# Altium footprint library Mosfet$.PcbLib: 62 footprints (part 2 of 4)
Each footprint in its own frame and in the unit in brackets; x right, y up, seen from the top. Pads: shape width x height; smd on the part's side, far side on the other; paste and mask are expansions set on the pad; w line width, h text height; cw(c..) or ccw(c..) is an arc to the next point about the centre after c.
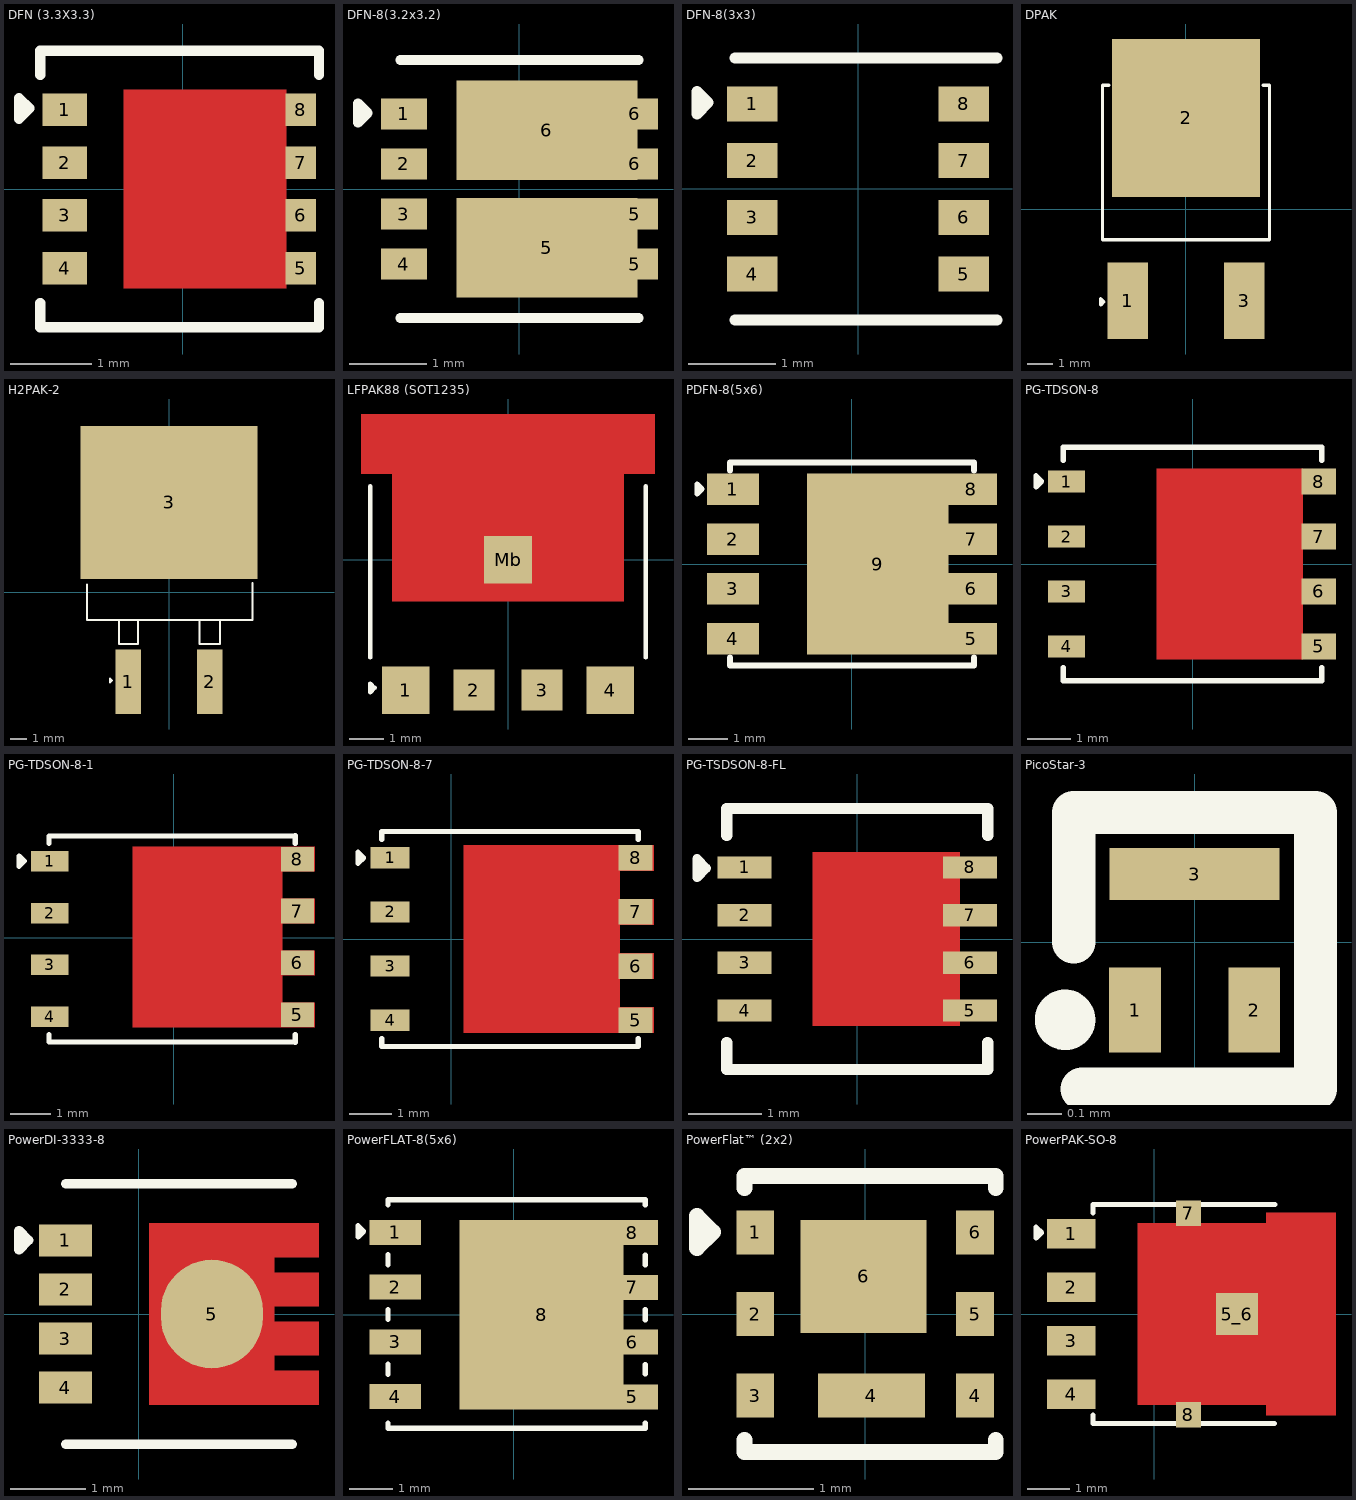
[diagram p1: the footprints below, top view; thin cyan lines are the x and y axes]

## DFN (3.3X3.3) [mm]
pads (8):
  rect 0.55x0.4 smd: 1(-1.45,0.975) 2(-1.45,0.325) 3(-1.45,-0.325) 4(-1.45,-0.975)
  rect 0.38x0.4 smd: 5(1.45,-0.975) 6(1.45,-0.325) 7(1.45,0.325) 8(1.45,0.975)
Top Layer:
  region: -0.725,1.225 -0.725,-1.225 1.275,-1.225 1.275,1.225
Top Overlay:
  lines w0.127: -1.749,-1.4 -1.749,-1.7 1.675,-1.7 1.675,-1.4 ; -1.749,1.4 -1.749,1.7 1.675,1.7 1.675,1.4 ; -2.011,0.864 -2.011,1.118 -1.884,0.991 -2.011,0.864
3D body "User Library-DFN 3_3x3_3.step": height 0.75, standoff 0, extent -1.7,-1.65 1.62,1.65

## DFN-8(3.2x3.2) [mm]
pads (10):
  rect 0.6x0.4 smd: 1(-1.5,0.975) 2(-1.5,0.325) 3(-1.5,-0.325) 4(-1.5,-0.975) 5(1.5,-0.975) 5(1.5,-0.325) 6(1.5,0.325) 6(1.5,0.975)
  rect 2.35x1.29 smd: 5(0.356,-0.762) 6(0.356,0.762)
Top Overlay:
  lines w0.127: -1.549,-1.676 1.549,-1.676 ; -1.549,1.676 1.549,1.676 ; -2.097,0.861 -1.97,0.988 -2.097,1.115 -2.097,0.861
3D body "2105241820_ALLPOWER-ShenZhen-Quan-Li-Semiconductor-AP4008QD_C2828588.STEP": height 0.77, standoff 0, extent -1.675,-1.635 1.675,1.635

## DFN-8(3x3) [mm]
pads (8):
  rect 0.58x0.4 smd: 1(-1.21,0.975) 2(-1.21,0.325) 3(-1.21,-0.325) 4(-1.21,-0.975) 5(1.21,-0.975) 6(1.21,-0.325) 7(1.21,0.325) 8(1.21,0.975)
Top Overlay:
  lines w0.127: -1.41,-1.5 1.59,-1.5 ; -1.41,1.5 1.59,1.5 ; -1.843,0.861 -1.843,1.115 -1.716,0.988 -1.843,0.861
3D body "C357850.step": height 0.82, standoff 0, extent -1.4,-1.46 1.4,1.46

## DPAK [mm]
pads (3):
  rect 1.6x3 smd: 1(-2.285,-3.59) 3(2.285,-3.59)
  rect 5.8x6.2 smd: 2(0,3.59)
Top Overlay:
  lines w0.127: -3.023,4.877 -3.277,4.877 -3.277,-1.194 3.277,-1.194 3.277,4.877 3.023,4.877 ; -3.353,-3.759 -3.353,-3.505 -3.226,-3.632 -3.353,-3.759
3D body "MC7805BDTRKG.STEP": height 2.51, standoff -0.01, extent -3.277,-3.988 3.223,5.918

## H2PAK-2 [mm]
pads (3):
  rect 1.6x4 smd paste+0 mask+0.051: 1(-2.54,-5.578) 2(2.54,-5.578)
  rect 11x9.5 smd paste+0 mask+0.051: 3(0,5.578)
Top Overlay:
  lines w0.127: -5.1,0.478 -5.1,-1.725 5.2,-1.725 5.2,0.578 ; -3.07,-1.725 -3.1,-1.725 -3.1,-3.225 -1.927,-3.225 -1.927,-1.725 ; 1.959,-1.725 1.9,-1.725 1.9,-3.225 3.178,-3.225 3.178,-1.725 ; -3.683,-5.62 -3.683,-5.366 -3.556,-5.493 -3.683,-5.62
3D body "C3278109.step": height 4.6, standoff 0, extent -5.1,-6.791 5.1,8.759

## LFPAK88 (SOT1235) [mm]
pads (5):
  rect 1.4x1.4 smd: 1(-3,-3.825) 4(3,-3.825) Mb(0,0)
  rect 1.2x1.2 smd: 2(-1,-3.825) 3(1,-3.825)
Top Layer:
  region: -4.3,4.273 4.3,4.273 4.3,2.521 3.4,2.521 3.4,-1.219 -3.4,-1.219 -3.4,2.521 -4.3,2.521
Top Overlay:
  lines w0.127: -4.039,-2.87 -4.039,2.159 ; 4.039,-2.87 4.039,2.159 ; -4.039,-3.886 -3.912,-3.759 -4.039,-3.632 -4.039,-3.886
3D body "PSMNR90-40SSHJ.STEP": height 1.7, standoff 0, extent -4,-3.975 4,4.075

## PDFN-8(5x6) [mm]
pads (9):
  rect 1.321x0.8 smd paste-100 mask+0.051: 1(-3.025,1.905) 2(-3.025,0.635) 3(-3.025,-0.635) 4(-3.025,-1.905) 5(3.025,-1.905) 6(3.025,-0.635) 7(3.025,0.635) 8(3.025,1.905)
  rect 3.6x4.6 smd paste-100 mask+0.051: 9(0.65,0)
Top Overlay:
  lines w0.127: -3.94,1.778 -3.94,2.032 -3.813,1.905 -3.94,1.778
  lines w0.152: -3.101,-2.376 -3.101,-2.586 3.101,-2.586 3.101,-2.376 ; -3.101,2.376 -3.101,2.586 3.101,2.586 3.101,2.376
Top Paste:
  region: -3.686,1.505 -2.365,1.505 -2.365,2.305 -3.686,2.305
  region: -3.686,0.235 -2.365,0.235 -2.365,1.035 -3.686,1.035
  region: -3.686,-1.035 -2.365,-1.035 -2.365,-0.235 -3.686,-0.235
  region: -2.365,-1.505 -3.686,-1.505 -3.686,-2.305 -2.365,-2.305
  region: 2.365,-2.305 3.686,-2.305 3.686,-1.505 2.45,-1.505 2.45,-1.035 3.686,-1.035 3.686,-0.235 2.45,-0.235 2.45,0.235 3.686,0.235 3.686,1.035 2.45,1.035 2.45,1.505 3.686,1.505 3.686,2.305 2.365,2.305 2.365,2.3 -1.15,2.3 -1.15,-2.3 2.365,-2.3
3D body "C202231.step": height 1.01, standoff 0, extent -3.05,-2.64 3.05,2.64

## PG-TDSON-8 [mm]
pads (8):
  rect 0.85x0.5 smd: 1(-2.912,1.905) 2(-2.912,0.635) 3(-2.912,-0.635) 4(-2.912,-1.905)
  rect 0.8x0.6 smd: 5(2.913,-1.905) 6(2.913,-0.635) 7(2.913,0.635) 8(2.913,1.905)
Top Layer:
  region: -0.838,2.205 -0.838,-2.205 2.552,-2.205 2.552,2.205
Top Overlay:
  lines w0.127: -2.986,-2.4 -2.986,-2.7 2.986,-2.7 2.986,-2.4 ; -2.986,2.4 -2.986,2.7 2.986,2.7 2.986,2.4 ; -3.617,1.78 -3.49,1.907 -3.617,2.034 -3.617,1.78
3D body "User Library-TDSON-8-1.STEP": height 1, standoff 0, extent -3.075,-2.675 3.075,2.675

## PG-TDSON-8-1 [mm]
pads (8):
  rect 0.925x0.5 smd paste-1: 1(-3.03,1.88) 2(-3.03,0.61) 3(-3.03,-0.66) 4(-3.03,-1.93)
  rect 0.8x0.6 smd paste-1: 5(3.03,-1.88) 6(3.03,-0.61) 7(3.03,0.66) 8(3.03,1.93)
Top Layer:
  region: 3.457,1.63 2.657,1.63 2.657,0.96 3.457,0.96 3.457,0.36 2.657,0.36 2.657,-0.31 3.457,-0.31 3.457,-0.91 2.657,-0.91 2.657,-1.58 3.457,-1.58 3.457,-2.18 -0.998,-2.18 -0.998,2.23 3.457,2.23
Top Overlay:
  lines w0.127: -3.046,-2.362 -3.046,-2.54 2.977,-2.549 2.977,-2.362 ; -3.046,2.312 -3.046,2.49 2.977,2.499 2.977,2.312 ; -3.782,1.753 -3.655,1.88 -3.782,2.007 -3.782,1.753
Top Paste:
  region: 0.757,-1.575 -0.743,-1.575 -0.743,-0.075 0.757,-0.075
  region: 0.757,0.125 -0.743,0.125 -0.743,1.625 0.757,1.625
  region: 2.457,0.125 0.957,0.125 0.957,1.625 2.457,1.625
  region: 3.407,-0.86 2.657,-0.86 2.657,-0.36 3.407,-0.36
  region: 3.407,0.41 2.657,0.41 2.657,0.91 3.407,0.91
  region: 2.457,-1.575 0.957,-1.575 0.957,-0.075 2.457,-0.075
  region: 3.407,-2.13 2.657,-2.13 2.657,-1.63 3.407,-1.63
  region: 3.407,1.68 2.657,1.68 2.657,2.18 3.407,2.18
  region: -2.618,-2.13 -3.443,-2.13 -3.443,-1.73 -2.618,-1.73
  region: -2.618,-0.86 -3.443,-0.86 -3.443,-0.46 -2.618,-0.46
  region: -2.618,0.41 -3.443,0.41 -3.443,0.81 -2.618,0.81
  region: -2.618,1.68 -3.443,1.68 -3.443,2.08 -2.618,2.08
Top Solder:
  region: 3.557,1.53 2.757,1.53 2.757,1.06 3.557,1.06 3.557,0.26 2.757,0.26 2.757,-0.21 3.557,-0.21 3.557,-1.01 2.757,-1.01 2.757,-1.48 3.557,-1.48 3.557,-2.28 -1.098,-2.28 -1.098,2.33 3.557,2.33
3D body "User Library-DQH0008A.STEP": height 1.05, standoff 0, extent -3,-2.5 3,2.5

## PG-TDSON-8-7 [mm]
pads (8):
  rect 0.925x0.5 smd paste-1: 1(-1.432,1.905) 2(-1.432,0.635) 3(-1.432,-0.635) 4(-1.432,-1.905)
  rect 0.8x0.6 smd paste-1: 5(4.331,-1.905) 6(4.331,-0.635) 7(4.331,0.635) 8(4.331,1.905)
Top Layer:
  region: 4.758,1.605 3.958,1.605 3.958,0.935 4.758,0.935 4.758,0.335 3.958,0.335 3.958,-0.335 4.758,-0.335 4.758,-0.935 3.958,-0.935 3.958,-1.605 4.758,-1.605 4.758,-2.205 0.303,-2.205 0.303,2.205 4.758,2.205
Top Overlay:
  lines w0.127: -1.626,-2.337 -1.626,-2.515 4.397,-2.524 4.397,-2.337 ; -1.626,2.337 -1.626,2.515 4.397,2.524 4.397,2.337 ; -2.184,1.778 -2.057,1.905 -2.184,2.032 -2.184,1.778
Top Paste:
  region: 2.058,-1.6 0.558,-1.6 0.558,-0.1 2.058,-0.1
  region: 2.058,0.1 0.558,0.1 0.558,1.6 2.058,1.6
  region: 3.758,0.1 2.258,0.1 2.258,1.6 3.758,1.6
  region: 4.708,-2.155 3.958,-2.155 3.958,-1.655 4.708,-1.655
  region: 4.708,-0.885 3.958,-0.885 3.958,-0.385 4.708,-0.385
  region: 4.708,0.385 3.958,0.385 3.958,0.885 4.708,0.885
  region: -1.02,-2.105 -1.845,-2.105 -1.845,-1.705 -1.02,-1.705
  region: -1.02,-0.835 -1.845,-0.835 -1.845,-0.435 -1.02,-0.435
  region: -1.02,0.435 -1.845,0.435 -1.845,0.835 -1.02,0.835
  region: -1.02,1.705 -1.845,1.705 -1.845,2.105 -1.02,2.105
  region: 3.758,-1.6 2.258,-1.6 2.258,-0.1 3.758,-0.1
  region: 4.708,1.655 3.958,1.655 3.958,2.155 4.708,2.155
Top Solder:
  region: 4.858,1.505 4.058,1.505 4.058,1.035 4.858,1.035 4.858,0.235 4.058,0.235 4.058,-0.235 4.858,-0.235 4.858,-1.035 4.058,-1.035 4.058,-1.505 4.858,-1.505 4.858,-2.305 0.203,-2.305 0.203,2.305 4.858,2.305
3D body "User Library-DQH0008A.STEP": height 1.05, standoff 0, extent -1.603,-2.525 4.397,2.475

## PG-TSDSON-8-FL [mil]
pads (8):
  rect 29x12 smd: 1(-60.5,38.39) 2(-60.5,12.8) 3(-60.5,-12.8) 4(-60.5,-38.39) 5(60.5,-38.39) 6(60.5,-12.8) 7(60.5,12.8) 8(60.5,38.39)
Top Layer:
  region: 55,-46.5 55,46.5 -24,46.5 -24,-46.5
Top Overlay:
  lines w5: -86,33 -86,43 -81,38 -86,33
  lines w6: -70,-55.49 -70,-70 70,-70 70,-55.49 ; -70,55.49 -70,70 70,70 70,55.49
3D body "PG-TSDSON-8-25_INF.step": height 39.09, standoff 0, extent -67.01,-67.01 67.01,67.01

## PicoStar-3 [mm]
pads (3):
  rect 0.152x0.25 smd mask+0.05: 1(-0.175,-0.2) 2(0.175,-0.2)
  rect 0.5x0.152 smd mask+0.05: 3(0,0.2)
Top Overlay:
  circle w0.127: c-0.381,-0.229 r0.025
  lines w0.127: -0.356,0 -0.356,0.381 0.356,0.381 0.356,-0.432 -0.33,-0.432
3D body "CSD25501F3.STEP": height 0.2, standoff -0.02, extent -0.3,-0.375 0.3,0.325

## PowerDI-3333-8 [mm]
pads (5):
  rect 0.7x0.42 smd paste-100 mask+0.05: 1(-0.97,0.975) 2(-0.97,0.325) 3(-0.97,-0.325) 4(-0.97,-0.975)
  oval 1.35x1.44 smd: 5(0.97,0)
Top Layer:
  region: 0.14,1.2 2.39,1.2 2.39,0.75 1.8,0.75 1.8,0.55 2.39,0.55 2.39,0.1 1.8,0.1 1.8,-0.1 2.39,-0.1 2.39,-0.55 1.8,-0.55 1.8,-0.75 2.39,-0.75 2.39,-1.2 0.14,-1.2
Top Overlay:
  lines w0.127: -0.965,-1.727 2.035,-1.727 ; -0.965,1.727 2.035,1.727 ; -1.586,0.85 -1.459,0.977 -1.586,1.104 -1.586,0.85
Top Paste:
  region: -0.62,1.19 -0.62,0.76 -1.32,0.76 -1.32,1.19
  region: -0.62,0.54 -0.62,0.11 -1.32,0.11 -1.32,0.54
  region: -0.62,-0.11 -0.62,-0.54 -1.32,-0.54 -1.32,-0.11
  region: -0.62,-0.76 -0.62,-1.19 -1.32,-1.19 -1.32,-0.76
  region: 2.39,-1.2 0.14,-1.2 0.14,1.2 2.39,1.2 2.39,0.75 1.8,0.75 1.8,0.55 2.39,0.55 2.39,0.1 1.8,0.1 1.8,-0.1 2.39,-0.1 2.39,-0.55 1.8,-0.55 1.8,-0.75 2.39,-0.75
3D body "C2802568.step": height 0.81, standoff 0, extent -1.12,-1.66 2.2,1.66

## PowerFLAT-8(5x6) [mm]
pads (9):
  rect 1.2x0.58 smd paste-100 mask+0.051: 1(-2.75,1.907) 2(-2.75,0.637) 3(-2.75,-0.633) 4(-2.75,-1.903) 5(2.75,-1.907) 6(2.75,-0.638) 7(2.75,0.632) 8(2.75,1.902)
  rect 3.8x4.4 smd paste-100 mask+0.051: 8(0.646,0)
Top Overlay:
  lines w0.127: -2.917,-2.525 -2.917,-2.639 3.052,-2.639 3.052,-2.52 ; -2.917,-1.381 -2.917,-1.154 ; -2.917,-0.111 -2.917,0.116 ; -2.917,1.159 -2.917,1.386 ; -2.917,2.556 -2.917,2.669 3.052,2.669 3.052,2.55 ; 3.052,-1.376 3.052,-1.159 ; 3.052,-0.117 3.052,0.111 ; 3.052,1.153 3.052,1.381 ; -3.614,1.806 -3.487,1.933 -3.614,2.06 -3.614,1.806
Top Paste:
  region: 3.35,2.192 2.546,2.192 2.546,2.2 -1.254,2.2 -1.254,-2.2 2.546,-2.2 2.546,-2.197 3.35,-2.197 3.35,-1.617 2.546,-1.617 2.546,-0.928 3.35,-0.928 3.35,-0.348 2.546,-0.348 2.546,0.342 3.35,0.342 3.35,0.922 2.546,0.922 2.546,1.612 3.35,1.612
  region: -3.35,1.617 -3.35,2.197 -2.15,2.197 -2.15,1.617
  region: -3.35,0.347 -3.35,0.927 -2.15,0.927 -2.15,0.347
  region: -3.35,-0.923 -3.35,-0.343 -2.15,-0.343 -2.15,-0.923
  region: -3.35,-2.193 -3.35,-1.613 -2.15,-1.613 -2.15,-2.193
3D body "STL110N10F7.step": height 1, standoff 0, extent -3.075,-2.6 3.075,2.6

## PowerFlat™ (2x2) [mm]
pads (8):
  rect 0.3x0.35 smd mask+0.08: 1(-0.875,0.65) 2(-0.875,0) 3(-0.875,-0.65) 4(0.875,-0.65) 5(0.875,0) 6(0.875,0.65)
  rect 0.85x0.35 smd mask+0.08: 4(0.05,-0.65)
  rect 1x0.9 smd mask+0.08: 6(-0.013,0.3)
Top Overlay:
  lines w0.127: -0.96,-1.005 -0.96,-1.1 1.04,-1.1 1.04,-1.005 ; -0.96,1.005 -0.96,1.1 1.04,1.1 1.04,1.005 ; -1.339,0.525 -1.212,0.652 -1.339,0.779 -1.339,0.525
3D body "C2969890.step": height 0.75, standoff 0, extent -1,-1 1,1

## PowerPAK-SO-8 [mm]
pads (7):
  rect 1.15x0.7 smd paste+0 mask+0.051: 1(-1.963,1.905) 2(-1.967,0.635) 3(-1.967,-0.635) 4(-1.963,-1.905)
  rect 1x1 smd: 5_6(1.967,0)
  rect 0.595x0.61 smd paste+0 mask+0.051: 7(0.813,2.388) 8(0.813,-2.388)
Top Layer:
  region: 4.317,-2.4 4.317,2.4 2.667,2.4 2.667,2.15 -0.383,2.15 -0.383,-2.15 2.667,-2.15 2.667,-2.4
Top Overlay:
  lines w0.12: -1.447,-2.4 -1.447,-2.601 2.853,-2.601 2.817,-2.6 ; -1.447,2.4 -1.447,2.601 2.853,2.601 2.867,2.6
  lines w0.127: -2.801,1.803 -2.801,2.057 -2.674,1.93 -2.801,1.803
3D body "SQJ422EP-T1_GE3.STEP": height 1.24, standoff -0.03, extent -2.237,-2.565 3.913,2.565